# Altium schematic symbol library TC4427EOA.SchLib: 1 symbol
Pins are listed as number, name and electrical type; pins without a type are passive.

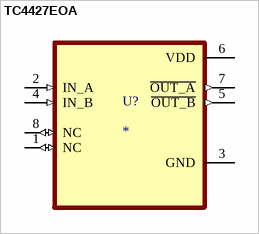
[diagram p0: symbol TC4427EOA]

## TC4427EOA
designator U?
Low-Side Gate Driver IC Non-Inverting 8-SOIC; MP: TC4427EOA; MF: Microchip; Check_prices: https://www.snapeda.com/parts/TC4427EOA/Microchip/view-part/?ref=eda; Value: *; Availability: In Stock; Price: None; Package: SOIC-8 Microchip; SnapEDA_Link: https://www.snapeda.com/parts/TC4427EOA/Microchip/view-part/?ref=snap; Purchase-URL: https://pricing.snapeda.com/search/part/TC4427EOA/?ref=eda
footprint SOIC127P599X175-8N
pins: 1 NC (io), 2 IN_A (in), 3 GND (power), 4 IN_B (in), 5 ~{OUT_B} (out), 6 VDD (power), 7 ~{OUT_A} (out), 8 NC (io)